# Altium footprint library Other.PcbLib: 67 footprints (part 3 of 5)
Each footprint in its own frame and in the unit in brackets; x right, y up, seen from the top. Pads: shape width x height; smd on the part's side, far side on the other; paste and mask are expansions set on the pad; w line width, h text height; cw(c..) or ccw(c..) is an arc to the next point about the centre after c.
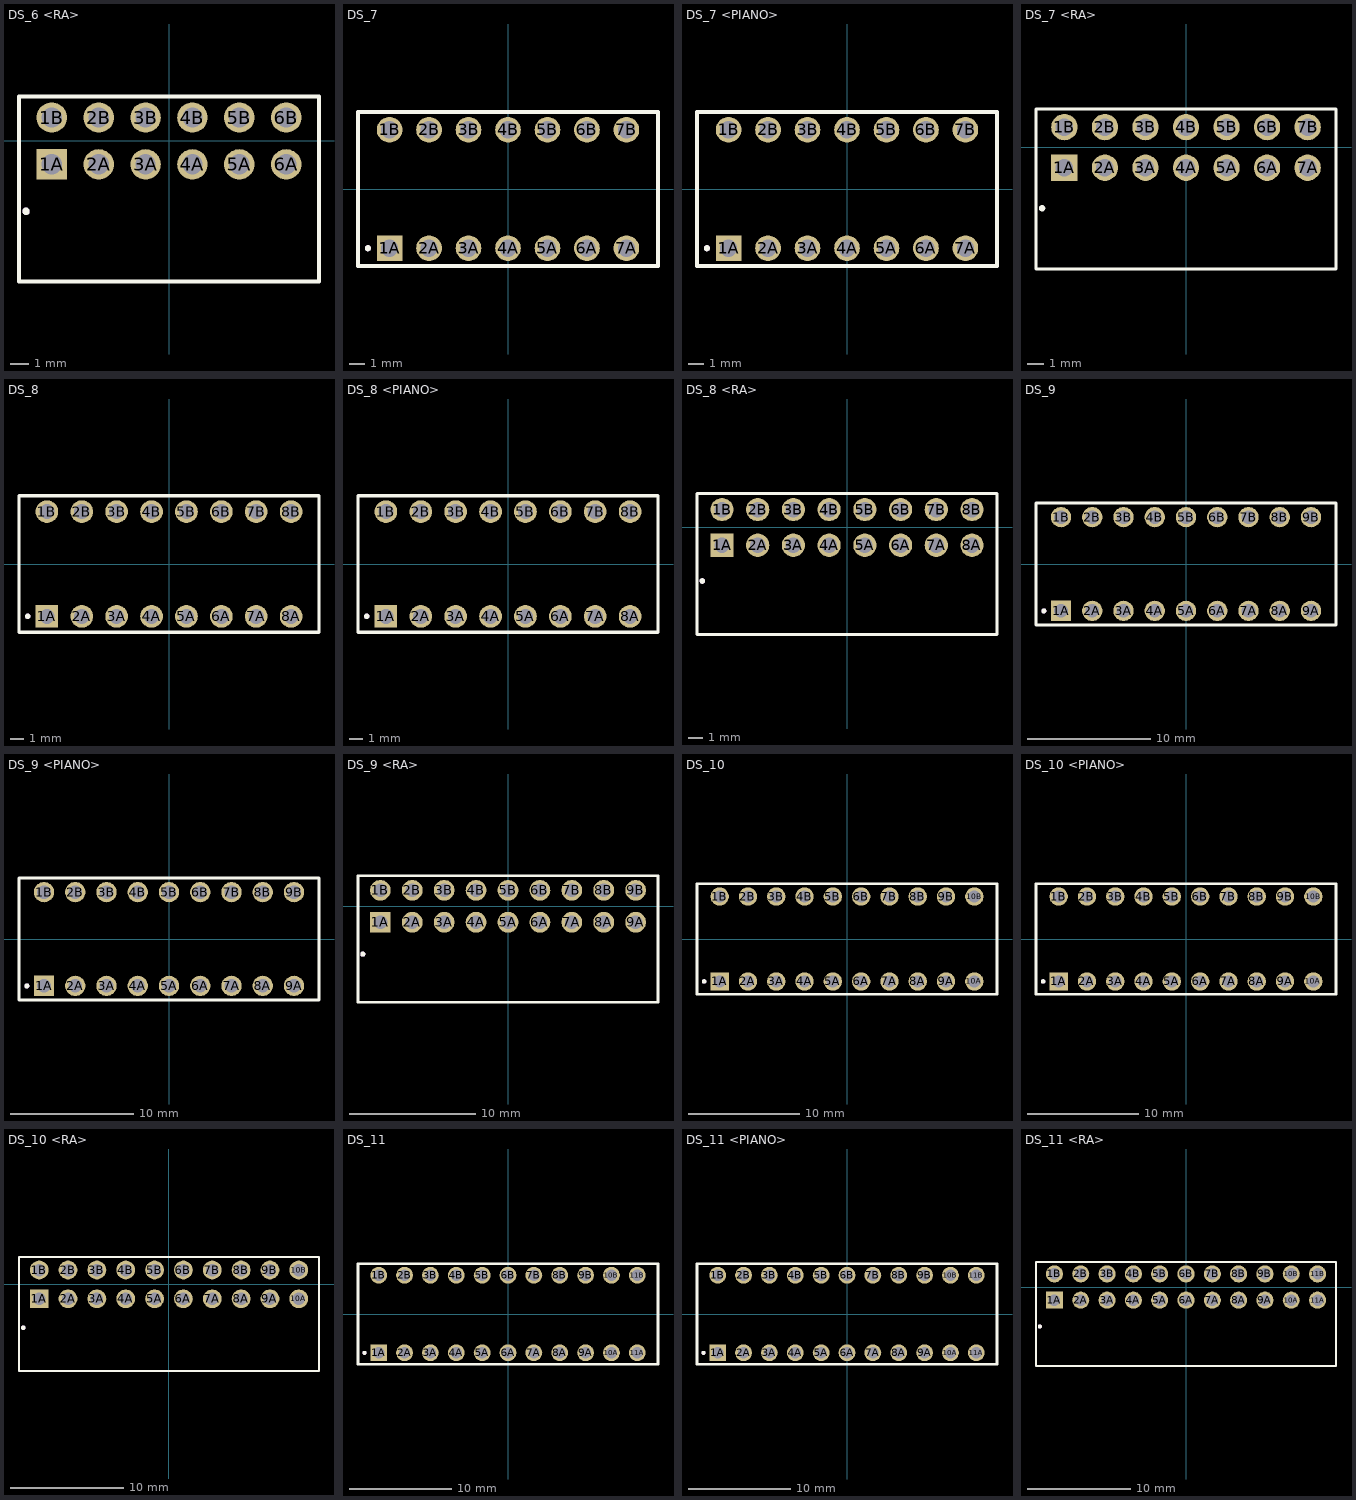
[diagram p2: the footprints below, top view; thin cyan lines are the x and y axes]

## DS_6 <RA> [mm]
height 7
pads (12):
  rect 1.65x1.65 hole 1.1: 1A(-6.35,-1.27)
  round 1.65 hole 1.1: 1B(-6.35,1.27) 2A(-3.81,-1.27) 2B(-3.81,1.27) 3A(-1.27,-1.27) 3B(-1.27,1.27) 4A(1.27,-1.27) 4B(1.27,1.27) 5A(3.81,-1.27) 5B(3.81,1.27) 6A(6.35,-1.27) 6B(6.35,1.27)
Top Overlay:
  circle w0.2: c-7.747,-3.81 r0.1
  lines w0.2: -8.128,-7.62 -8.128,2.413 8.128,2.413 8.128,-7.62
  lines w0.203: -8.128,-7.62 8.128,-7.62
Mechanical 13:
  circle w0.2: c-7.747,-3.81 r0.1
3D body "DA06R.STEP": height 10.03, standoff -4.27, extent -8.12,-8.87 8.12,1.345

## DS_7 [mm]
height 7
pads (14):
  rect 1.65x1.65 hole 1.1: 1A(-7.62,-3.81)
  round 1.65 hole 1.1: 1B(-7.62,3.81) 2A(-5.08,-3.81) 2B(-5.08,3.81) 3A(-2.54,-3.81) 3B(-2.54,3.81) 4A(0,-3.81) 4B(0,3.81) 5A(2.54,-3.81) 5B(2.54,3.81) 6A(5.08,-3.81) 6B(5.08,3.81) 7A(7.62,-3.81) 7B(7.62,3.81)
Top Overlay:
  circle w0.2: c-9.017,-3.81 r0.1
  lines w0.254: -9.652,-4.953 9.652,-4.953 9.652,4.953 -9.652,4.953 -9.652,-4.953
Mechanical 13:
  circle w0.2: c-9.017,-3.81 r0.1
3D body "DS1040-07 (DIP_switch).stp": height 6.93, standoff -3.72, extent -9.62,-4.95 9.62,4.95

## DS_7 <PIANO> [mm]
height 7
pads (14):
  rect 1.65x1.65 hole 1.1: 1A(-7.62,-3.81)
  round 1.65 hole 1.1: 1B(-7.62,3.81) 2A(-5.08,-3.81) 2B(-5.08,3.81) 3A(-2.54,-3.81) 3B(-2.54,3.81) 4A(0,-3.81) 4B(0,3.81) 5A(2.54,-3.81) 5B(2.54,3.81) 6A(5.08,-3.81) 6B(5.08,3.81) 7A(7.62,-3.81) 7B(7.62,3.81)
Top Overlay:
  circle w0.2: c-9.017,-3.81 r0.1
  lines w0.254: -9.652,-4.953 9.652,-4.953 9.652,4.953 -9.652,4.953 -9.652,-4.953
Mechanical 13:
  circle w0.2: c-9.017,-3.81 r0.1
3D body "DS1040-07RT.STEP": height 8.8, standoff -3.85, extent -9.62,-6.45 9.62,4.95

## DS_7 <RA> [mm]
height 7
pads (14):
  rect 1.65x1.65 hole 1.1: 1A(-7.62,-1.27)
  round 1.65 hole 1.1: 1B(-7.62,1.27) 2A(-5.08,-1.27) 2B(-5.08,1.27) 3A(-2.54,-1.27) 3B(-2.54,1.27) 4A(0,-1.27) 4B(0,1.27) 5A(2.54,-1.27) 5B(2.54,1.27) 6A(5.08,-1.27) 6B(5.08,1.27) 7A(7.62,-1.27) 7B(7.62,1.27)
Top Overlay:
  circle w0.2: c-9.017,-3.81 r0.1
  lines w0.2: -9.398,-7.62 -9.398,2.413 9.398,2.413 9.398,-7.62
  lines w0.203: -9.398,-7.62 9.398,-7.62
3D body "DA07R.STEP": height 10.03, standoff -4.27, extent -9.39,-8.87 9.39,1.345

## DS_8 [mm]
height 7
pads (16):
  rect 1.65x1.65 hole 1.1: 1A(-8.89,-3.81)
  round 1.65 hole 1.1: 1B(-8.89,3.81) 2A(-6.35,-3.81) 2B(-6.35,3.81) 3A(-3.81,-3.81) 3B(-3.81,3.81) 4A(-1.27,-3.81) 4B(-1.27,3.81) 5A(1.27,-3.81) 5B(1.27,3.81) 6A(3.81,-3.81) 6B(3.81,3.81) 7A(6.35,-3.81) 7B(6.35,3.81) 8A(8.89,-3.81) 8B(8.89,3.81)
Top Overlay:
  circle w0.2: c-10.287,-3.81 r0.1
  lines w0.254: -10.922,-4.953 10.922,-4.953 10.922,4.953 -10.922,4.953 -10.922,-4.953
Mechanical 13:
  circle w0.2: c-10.287,-3.81 r0.1
3D body "DS1040-08 (DIP_switch).stp": height 6.93, standoff -3.72, extent -10.89,-4.95 10.89,4.95

## DS_8 <PIANO> [mm]
height 7
pads (16):
  rect 1.65x1.65 hole 1.1: 1A(-8.89,-3.81)
  round 1.65 hole 1.1: 1B(-8.89,3.81) 2A(-6.35,-3.81) 2B(-6.35,3.81) 3A(-3.81,-3.81) 3B(-3.81,3.81) 4A(-1.27,-3.81) 4B(-1.27,3.81) 5A(1.27,-3.81) 5B(1.27,3.81) 6A(3.81,-3.81) 6B(3.81,3.81) 7A(6.35,-3.81) 7B(6.35,3.81) 8A(8.89,-3.81) 8B(8.89,3.81)
Top Overlay:
  circle w0.2: c-10.287,-3.81 r0.1
  lines w0.254: -10.922,-4.953 -10.922,4.953 10.922,4.953 10.922,-4.953 -10.922,-4.953
Mechanical 13:
  circle w0.2: c-10.287,-3.81 r0.1
3D body "DS1040-08RT.STEP": height 8.8, standoff -3.85, extent -10.89,-6.45 10.89,4.95

## DS_8 <RA> [mm]
height 7
pads (16):
  rect 1.65x1.65 hole 1.1: 1A(-8.89,-1.27)
  round 1.65 hole 1.1: 1B(-8.89,1.27) 2A(-6.35,-1.27) 2B(-6.35,1.27) 3A(-3.81,-1.27) 3B(-3.81,1.27) 4A(-1.27,-1.27) 4B(-1.27,1.27) 5A(1.27,-1.27) 5B(1.27,1.27) 6A(3.81,-1.27) 6B(3.81,1.27) 7A(6.35,-1.27) 7B(6.35,1.27) 8A(8.89,-1.27) 8B(8.89,1.27)
Top Overlay:
  circle w0.2: c-10.287,-3.81 r0.1
  lines w0.2: -10.668,-7.62 -10.668,2.413 10.668,2.413 10.668,-7.62
  lines w0.203: -10.668,-7.62 10.668,-7.62
Mechanical 13:
  circle w0.2: c-10.287,-3.81 r0.1
3D body "DA08R.STEP": height 10.03, standoff -4.27, extent -10.66,-8.87 10.66,1.345

## DS_9 [mm]
height 7
pads (18):
  rect 1.65x1.65 hole 1.1: 1A(-10.16,-3.81)
  round 1.65 hole 1.1: 1B(-10.16,3.81) 2A(-7.62,-3.81) 2B(-7.62,3.81) 3A(-5.08,-3.81) 3B(-5.08,3.81) 4A(-2.54,-3.81) 4B(-2.54,3.81) 5A(0,-3.81) 5B(0,3.81) 6A(2.54,-3.81) 6B(2.54,3.81) 7A(5.08,-3.81) 7B(5.08,3.81) 8A(7.62,-3.81) 8B(7.62,3.81) 9A(10.16,-3.81) 9B(10.16,3.81)
Top Overlay:
  circle w0.2: c-11.557,-3.81 r0.1
  lines w0.254: -12.192,-4.953 12.192,-4.953 12.192,4.953 -12.192,4.953 -12.192,-4.953
Mechanical 13:
  circle w0.2: c-11.557,-3.81 r0.1
3D body "DS1040-09 (DIP_switch).stp": height 6.93, standoff -3.72, extent -12.16,-4.95 12.16,4.95

## DS_9 <PIANO> [mm]
height 7
pads (18):
  rect 1.65x1.65 hole 1.1: 1A(-10.16,-3.81)
  round 1.65 hole 1.1: 1B(-10.16,3.81) 2A(-7.62,-3.81) 2B(-7.62,3.81) 3A(-5.08,-3.81) 3B(-5.08,3.81) 4A(-2.54,-3.81) 4B(-2.54,3.81) 5A(0,-3.81) 5B(0,3.81) 6A(2.54,-3.81) 6B(2.54,3.81) 7A(5.08,-3.81) 7B(5.08,3.81) 8A(7.62,-3.81) 8B(7.62,3.81) 9A(10.16,-3.81) 9B(10.16,3.81)
Top Overlay:
  circle w0.2: c-11.557,-3.81 r0.1
  lines w0.254: -12.192,-4.953 -12.192,4.953 12.192,4.953 12.192,-4.953 -12.192,-4.953
Mechanical 13:
  circle w0.2: c-11.557,-3.81 r0.1
3D body "DS1040-09RT.STEP": height 8.8, standoff -3.85, extent -12.16,-6.45 12.16,4.95

## DS_9 <RA> [mm]
height 7
pads (18):
  rect 1.65x1.65 hole 1.1: 1A(-10.16,-1.27)
  round 1.65 hole 1.1: 1B(-10.16,1.27) 2A(-7.62,-1.27) 2B(-7.62,1.27) 3A(-5.08,-1.27) 3B(-5.08,1.27) 4A(-2.54,-1.27) 4B(-2.54,1.27) 5A(0,-1.27) 5B(0,1.27) 6A(2.54,-1.27) 6B(2.54,1.27) 7A(5.08,-1.27) 7B(5.08,1.27) 8A(7.62,-1.27) 8B(7.62,1.27) 9A(10.16,-1.27) 9B(10.16,1.27)
Top Overlay:
  circle w0.2: c-11.557,-3.81 r0.1
  lines w0.2: -11.938,-7.62 -11.938,2.413 11.938,2.413 11.938,-7.62
  lines w0.203: -11.938,-7.62 11.938,-7.62
Mechanical 13:
  circle w0.2: c-11.557,-3.81 r0.1
3D body "DA09R.STEP": height 10.03, standoff -4.27, extent -11.93,-8.87 11.93,1.345

## DS_10 [mm]
height 7
pads (20):
  rect 1.65x1.65 hole 1.1: 1A(-11.43,-3.81)
  round 1.65 hole 1.1: 1B(-11.43,3.81) 2A(-8.89,-3.81) 2B(-8.89,3.81) 3A(-6.35,-3.81) 3B(-6.35,3.81) 4A(-3.81,-3.81) 4B(-3.81,3.81) 5A(-1.27,-3.81) 5B(-1.27,3.81) 6A(1.27,-3.81) 6B(1.27,3.81) 7A(3.81,-3.81) 7B(3.81,3.81) 8A(6.35,-3.81) 8B(6.35,3.81) 9A(8.89,-3.81) 9B(8.89,3.81) 10A(11.43,-3.81) 10B(11.43,3.81)
Top Overlay:
  circle w0.2: c-12.827,-3.81 r0.1
  lines w0.254: -13.462,-4.953 13.462,-4.953 13.462,4.953 -13.462,4.953 -13.462,-4.953
Mechanical 13:
  circle w0.2: c-12.827,-3.81 r0.1
3D body "DS1040-10 (DIP_switch).stp": height 6.93, standoff -3.72, extent -13.43,-4.95 13.43,4.95

## DS_10 <PIANO> [mm]
height 7
pads (20):
  rect 1.65x1.65 hole 1.1: 1A(-11.43,-3.81)
  round 1.65 hole 1.1: 1B(-11.43,3.81) 2A(-8.89,-3.81) 2B(-8.89,3.81) 3A(-6.35,-3.81) 3B(-6.35,3.81) 4A(-3.81,-3.81) 4B(-3.81,3.81) 5A(-1.27,-3.81) 5B(-1.27,3.81) 6A(1.27,-3.81) 6B(1.27,3.81) 7A(3.81,-3.81) 7B(3.81,3.81) 8A(6.35,-3.81) 8B(6.35,3.81) 9A(8.89,-3.81) 9B(8.89,3.81) 10A(11.43,-3.81) 10B(11.43,3.81)
Top Overlay:
  circle w0.2: c-12.827,-3.81 r0.1
  lines w0.254: -13.462,-4.953 -13.462,4.953 13.462,4.953 13.462,-4.953 -13.462,-4.953
Mechanical 13:
  circle w0.2: c-12.827,-3.81 r0.1
3D body "DS1040-10RT.STEP": height 8.8, standoff -3.85, extent -13.43,-6.45 13.43,4.95

## DS_10 <RA> [mm]
height 7
pads (20):
  rect 1.65x1.65 hole 1.1: 1A(-11.43,-1.27)
  round 1.65 hole 1.1: 1B(-11.43,1.27) 2A(-8.89,-1.27) 2B(-8.89,1.27) 3A(-6.35,-1.27) 3B(-6.35,1.27) 4A(-3.81,-1.27) 4B(-3.81,1.27) 5A(-1.27,-1.27) 5B(-1.27,1.27) 6A(1.27,-1.27) 6B(1.27,1.27) 7A(3.81,-1.27) 7B(3.81,1.27) 8A(6.35,-1.27) 8B(6.35,1.27) 9A(8.89,-1.27) 9B(8.89,1.27) 10A(11.43,-1.27) 10B(11.43,1.27)
Top Overlay:
  circle w0.2: c-12.827,-3.81 r0.1
  lines w0.2: -13.208,-7.62 -13.208,2.413 13.208,2.413 13.208,-7.62
  lines w0.203: -13.208,-7.62 13.208,-7.62
Mechanical 13:
  circle w0.2: c-12.827,-3.81 r0.1
3D body "DA10R.STEP": height 10.03, standoff -4.27, extent -13.2,-8.87 13.2,1.345

## DS_11 [mm]
height 7
pads (22):
  rect 1.65x1.65 hole 1.1: 1A(-12.7,-3.81)
  round 1.65 hole 1.1: 1B(-12.7,3.81) 2A(-10.16,-3.81) 2B(-10.16,3.81) 3A(-7.62,-3.81) 3B(-7.62,3.81) 4A(-5.08,-3.81) 4B(-5.08,3.81) 5A(-2.54,-3.81) 5B(-2.54,3.81) 6A(0,-3.81) 6B(0,3.81) 7A(2.54,-3.81) 7B(2.54,3.81) 8A(5.08,-3.81) 8B(5.08,3.81) 9A(7.62,-3.81) 9B(7.62,3.81) 10A(10.16,-3.81) 10B(10.16,3.81) 11A(12.7,-3.81) 11B(12.7,3.81)
Top Overlay:
  circle w0.2: c-14.097,-3.81 r0.1
  lines w0.254: -14.732,-4.953 14.732,-4.953 14.732,4.953 -14.732,4.953 -14.732,-4.953
Mechanical 13:
  circle w0.2: c-14.097,-3.81 r0.1
3D body "DS1040-11 (DIP_switch).stp": height 6.93, standoff -3.72, extent -14.7,-4.95 14.7,4.95

## DS_11 <PIANO> [mm]
height 7
pads (22):
  rect 1.65x1.65 hole 1.1: 1A(-12.7,-3.81)
  round 1.65 hole 1.1: 1B(-12.7,3.81) 2A(-10.16,-3.81) 2B(-10.16,3.81) 3A(-7.62,-3.81) 3B(-7.62,3.81) 4A(-5.08,-3.81) 4B(-5.08,3.81) 5A(-2.54,-3.81) 5B(-2.54,3.81) 6A(0,-3.81) 6B(0,3.81) 7A(2.54,-3.81) 7B(2.54,3.81) 8A(5.08,-3.81) 8B(5.08,3.81) 9A(7.62,-3.81) 9B(7.62,3.81) 10A(10.16,-3.81) 10B(10.16,3.81) 11A(12.7,-3.81) 11B(12.7,3.81)
Top Overlay:
  circle w0.2: c-14.097,-3.81 r0.1
  lines w0.254: -14.732,-4.953 14.732,-4.953 14.732,4.953 -14.732,4.953 -14.732,-4.953
Mechanical 13:
  circle w0.2: c-14.097,-3.81 r0.1
3D body "DS1040-11RT.STEP": height 8.8, standoff -3.85, extent -14.7,-6.45 14.7,4.95

## DS_11 <RA> [mm]
height 7
pads (22):
  rect 1.65x1.65 hole 1.1: 1A(-12.7,-1.27)
  round 1.65 hole 1.1: 1B(-12.7,1.27) 2A(-10.16,-1.27) 2B(-10.16,1.27) 3A(-7.62,-1.27) 3B(-7.62,1.27) 4A(-5.08,-1.27) 4B(-5.08,1.27) 5A(-2.54,-1.27) 5B(-2.54,1.27) 6A(0,-1.27) 6B(0,1.27) 7A(2.54,-1.27) 7B(2.54,1.27) 8A(5.08,-1.27) 8B(5.08,1.27) 9A(7.62,-1.27) 9B(7.62,1.27) 10A(10.16,-1.27) 10B(10.16,1.27) 11A(12.7,-1.27) 11B(12.7,1.27)
Top Overlay:
  circle w0.2: c-14.097,-3.81 r0.1
  lines w0.2: -14.478,-7.62 -14.478,2.413 14.478,2.413 14.478,-7.62
  lines w0.203: -14.478,-7.62 14.478,-7.62
Mechanical 13:
  circle w0.2: c-14.097,-3.81 r0.1
3D body "DA11R.STEP": height 10.03, standoff -4.27, extent -14.47,-8.87 14.47,1.345